# Altium footprint library IntegratedCircuit.PcbLib: 41 footprints (part 1 of 3)
Each footprint in its own frame and in the unit in brackets; x right, y up, seen from the top. Pads: shape width x height; smd on the part's side, far side on the other; paste and mask are expansions set on the pad; w line width, h text height; cw(c..) or ccw(c..) is an arc to the next point about the centre after c.
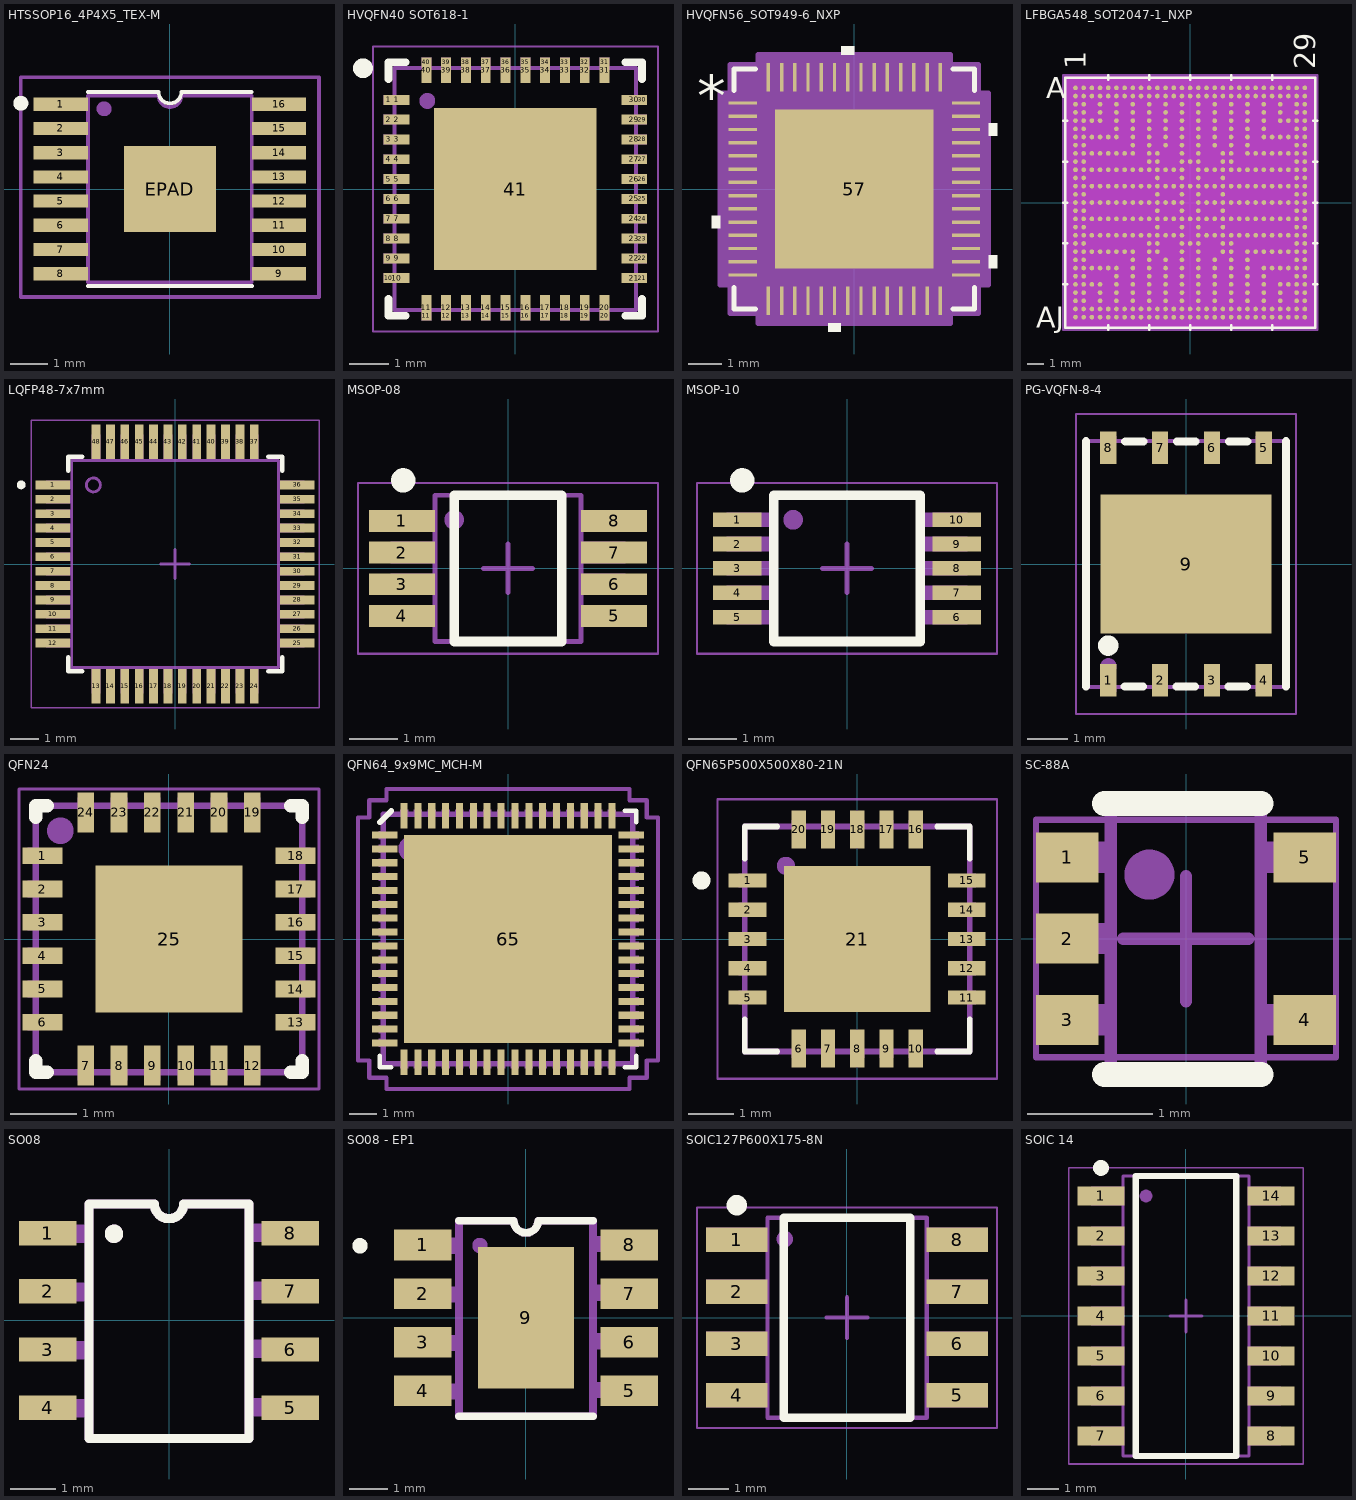
[diagram p0: the footprints below, top view; thin cyan lines are the x and y axes]

## HTSSOP16_4P4X5_TEX-M [mil]
pads (17):
  rect 57.5x14 smd paste+0 mask+0: 1(-115.25,89.57) 2(-115.25,63.98) 3(-115.25,38.39) 4(-115.25,12.8) 5(-115.25,-12.8) 6(-115.25,-38.39) 7(-115.25,-63.98) 8(-115.25,-89.57) 9(115.25,-89.57) 10(115.25,-63.98) 11(115.25,-38.39) 12(115.25,-12.8) 13(115.25,12.8) 14(115.25,38.39) 15(115.25,63.98) 16(115.25,89.57)
  rect 96.85x90.94 smd paste+0 mask+0: EPAD(0,0)
Top Overlay:
  circle w11.81: c-157.48,90.55 r1.97
  lines w3.94: -86.61,-102.36 86.61,-102.36 ; -86.5,102.44 -12,102.44 ccw(c0,102.44) 12,102.44 86.5,102.44
Top Assembly:
  circle w11.81: c-69.55,84.76 r1.97
  region: 122,95.57 86.5,95.57 86.5,83.57 122,83.57
  region: 122,69.98 86.5,69.98 86.5,57.98 122,57.98
  region: 122,44.39 86.5,44.39 86.5,32.39 122,32.39
  region: 122,18.8 86.5,18.8 86.5,6.8 122,6.8
  region: 122,-6.8 86.5,-6.8 86.5,-18.8 122,-18.8
  region: 122,-32.39 86.5,-32.39 86.5,-44.39 122,-44.39
  region: 122,-57.98 86.5,-57.98 86.5,-69.98 122,-69.98
  region: 122,-83.57 86.5,-83.57 86.5,-95.57 122,-95.57
  rectangle: -122,-95.57 -86.5,-83.57
  rectangle: -122,-69.98 -86.5,-57.98
  rectangle: -122,-44.39 -86.5,-32.39
  rectangle: -122,-18.8 -86.5,-6.8
  rectangle: -122,6.8 -86.5,18.8
  rectangle: -122,32.39 -86.5,44.39
  rectangle: -122,57.98 -86.5,69.98
  rectangle: -122,83.57 -86.5,95.57
  lines w3.94: -86.5,-95.57 -86.5,-83.57 ; -86.5,-69.98 -86.5,-57.98 ; -86.5,-44.39 -86.5,-32.39 ; -86.5,-18.8 -86.5,-6.8 ; -86.5,6.8 -86.5,18.8 ; -86.5,32.39 -86.5,44.39 ; -86.5,57.98 -86.5,69.98 ; -86.5,83.57 -86.5,95.57 ; 86.5,-95.57 86.5,-83.57 ; 86.5,-69.98 86.5,-57.98 ; 86.5,-44.39 86.5,-32.39 ; 86.5,-18.8 86.5,-6.8 ; 86.5,6.8 86.5,18.8 ; 86.5,32.39 86.5,44.39 ; 86.5,57.98 86.5,69.98 ; 86.5,83.57 86.5,95.57 ; -86.5,-98.5 -86.5,98.5 -12,98.5 ccw(c0,98.5) 12,98.5 86.5,98.5 86.5,-98.5 -86.5,-98.5
  text ".Designator" at -147.59,-9.84 h29.53
Mechanical 15:
  lines w3.94: -39.37,0 39.37,0 ; 0,-39.37 0,39.37 ; -157.48,-114.17 157.48,-114.17 157.48,118.11 -157.48,118.11 -157.48,-114.17
3D body "HTSSOP16_4P4X5_TEX.step": height 47.09, standoff 0, extent -122.01,-98.5 122.01,98.5

## HVQFN40 SOT618-1 [mm] "QFN, 40-Leads, Body 6.00x6.00mm, Pitch 0.50mm, Thermal Pad 4.10x4.10mm, IPC Medium Density"
height 1
pads (81):
  rect 0.25x0.25 on Mech13: 1(-3.2,2.25) 2(-3.2,1.75) 3(-3.2,1.25) 4(-3.2,0.75) 5(-3.2,0.25) 6(-3.2,-0.25) 7(-3.2,-0.75) 8(-3.2,-1.25) 9(-3.2,-1.75) 10(-3.2,-2.25) 11(-2.25,-3.2) 12(-1.75,-3.2) 13(-1.25,-3.2) 14(-0.75,-3.2) 15(-0.25,-3.2) 16(0.25,-3.2) 17(0.75,-3.2) 18(1.25,-3.2) 19(1.75,-3.2) 20(2.25,-3.2) 21(3.2,-2.25) 22(3.2,-1.75) 23(3.2,-1.25) 24(3.2,-0.75) 25(3.2,-0.25) 26(3.2,0.25) 27(3.2,0.75) 28(3.2,1.25) 29(3.2,1.75) 30(3.2,2.25) 31(2.25,3.2) 32(1.75,3.2) 33(1.25,3.2) 34(0.75,3.2) 35(0.25,3.2) 36(-0.25,3.2) 37(-0.75,3.2) 38(-1.25,3.2) 39(-1.75,3.2) 40(-2.25,3.2)
  rect 0.65x0.25 smd: 1(-3,2.25) 2(-3,1.75) 3(-3,1.25) 4(-3,0.75) 5(-3,0.25) 6(-3,-0.25) 7(-3,-0.75) 8(-3,-1.25) 9(-3,-1.75) 10(-3,-2.25) 21(3,-2.25) 22(3,-1.75) 23(3,-1.25) 24(3,-0.75) 25(3,-0.25) 26(3,0.25) 27(3,0.75) 28(3,1.25) 29(3,1.75) 30(3,2.25)
  rect 0.25x0.65 smd: 11(-2.25,-3) 12(-1.75,-3) 13(-1.25,-3) 14(-0.75,-3) 15(-0.25,-3) 16(0.25,-3) 17(0.75,-3) 18(1.25,-3) 19(1.75,-3) 20(2.25,-3) 31(2.25,3) 32(1.75,3) 33(1.25,3) 34(0.75,3) 35(0.25,3) 36(-0.25,3) 37(-0.75,3) 38(-1.25,3) 39(-1.75,3) 40(-2.25,3)
  rect 4.1x4.1 smd: 41(0,0)
Top Overlay:
  circle w0.25: c-3.85,3.05 r0.125
  lines w0.2: -3.2,-2.775 -3.2,-3.2 -2.775,-3.2 ; -3.2,2.775 -3.2,3.2 -2.775,3.2 ; 2.775,-3.2 3.2,-3.2 3.2,-2.775 ; 2.775,3.2 3.2,3.2 3.2,2.775
Top Assembly:
  circle w0.3: c-2.225,2.225 r0.05
  lines w0.1: -3.05,-3.05 -3.05,3.05 3.05,3.05 3.05,-3.05 -3.05,-3.05
  text ".Designator" at -3.749,-0.25 h0.75
Mechanical 15:
  lines w0.05: -3.6,-3.6 -3.6,3.6 3.6,3.6 3.6,-3.6 -3.6,-3.6
  lines w0.1: -0.5,0 0.5,0 ; 0,-0.5 0,0.5
3D body "QFN-40.STEP": height 1.06, standoff 0.01, extent -3.075,-3.075 3.075,3.075

## HVQFN56_SOT949-6_NXP [mm]
pads (57):
  rect 0.859x0.102 smd paste+0 mask+0: 1(-3.376,2.6) 2(-3.376,2.2) 3(-3.376,1.8) 4(-3.376,1.4) 5(-3.376,1) 6(-3.376,0.6) 7(-3.376,0.2) 8(-3.376,-0.2) 9(-3.376,-0.6) 10(-3.376,-1) 11(-3.376,-1.4) 12(-3.376,-1.8) 13(-3.376,-2.2) 14(-3.376,-2.6) 29(3.376,-2.6) 30(3.376,-2.2) 31(3.376,-1.8) 32(3.376,-1.4) 33(3.376,-1) 34(3.376,-0.6) 35(3.376,-0.2) 36(3.376,0.2) 37(3.376,0.6) 38(3.376,1) 39(3.376,1.4) 40(3.376,1.8) 41(3.376,2.2) 42(3.376,2.6)
  rect 0.102x0.859 smd paste+0 mask+0: 15(-2.6,-3.376) 16(-2.2,-3.376) 17(-1.8,-3.376) 18(-1.4,-3.376) 19(-1,-3.376) 20(-0.6,-3.376) 21(-0.2,-3.376) 22(0.2,-3.376) 23(0.6,-3.376) 24(1,-3.376) 25(1.4,-3.376) 26(1.8,-3.376) 27(2.2,-3.376) 28(2.6,-3.376) 43(2.6,3.376) 44(2.2,3.376) 45(1.8,3.376) 46(1.4,3.376) 47(1,3.376) 48(0.6,3.376) 49(0.2,3.376) 50(-0.2,3.376) 51(-0.6,3.376) 52(-1,3.376) 53(-1.4,3.376) 54(-1.8,3.376) 55(-2.2,3.376) 56(-2.6,3.376)
  rect 4.801x4.801 smd paste-2.4 mask+0: 57(0,0)
Top Overlay:
  region: -0.009,4.059 -0.39,4.059 -0.39,4.313 -0.009,4.313
  region: 4.059,1.99 4.313,1.99 4.313,1.609 4.059,1.609
  region: 4.059,-2.01 4.313,-2.01 4.313,-2.391 4.059,-2.391
  region: -0.409,-4.059 -0.79,-4.059 -0.79,-4.313 -0.409,-4.313
  region: -4.059,-0.81 -4.313,-0.81 -4.313,-1.191 -4.059,-1.191
  lines w0.152: -3.632,-2.984 -3.632,-3.632 -2.984,-3.632 ; -3.632,2.984 -3.632,3.632 -2.984,3.632 ; 2.984,-3.632 3.632,-3.632 3.632,-2.984 ; 2.984,3.632 3.632,3.632 3.632,2.984
  text "*" at -4.758,2.165 h1.27
Top Paste:
  region: 2.3,-0.9 0.9,-0.9 0.9,-2.3 2.3,-2.3
  region: 2.3,0.7 0.9,0.7 0.9,-0.7 2.3,-0.7
  region: 2.3,2.3 0.9,2.3 0.9,0.9 2.3,0.9
  region: 0.7,-0.9 -0.7,-0.9 -0.7,-2.3 0.7,-2.3
  region: 0.7,0.7 -0.7,0.7 -0.7,-0.7 0.7,-0.7
  region: 0.7,2.3 -0.7,2.3 -0.7,0.9 0.7,0.9
  region: -0.9,-0.9 -2.3,-0.9 -2.3,-2.3 -0.9,-2.3
  region: -0.9,0.7 -2.3,0.7 -2.3,-0.7 -0.9,-0.7
  region: -0.9,2.3 -2.3,2.3 -2.3,0.9 -0.9,0.9
Top Assembly:
  lines w0.025: -3.505,2.235 -2.235,3.505 ; -3.505,-3.505 -3.505,3.505 3.505,3.505 3.505,-3.505 -3.505,-3.505 ; -3.505,-2.676 -3.505,-2.524 -3.505,-2.676 ; -3.505,-2.276 -3.505,-2.124 -3.505,-2.276 ; -3.505,-1.876 -3.505,-1.724 -3.505,-1.876 ; -3.505,-1.476 -3.505,-1.324 -3.505,-1.476 ; -3.505,-1.076 -3.505,-0.924 -3.505,-1.076 ; -3.505,-0.676 -3.505,-0.524 -3.505,-0.676 ; -3.505,-0.276 -3.505,-0.124 -3.505,-0.276 ; -3.505,0.124 -3.505,0.276 -3.505,0.124 ; -3.505,0.524 -3.505,0.676 -3.505,0.524 ; -3.505,0.924 -3.505,1.076 -3.505,0.924 ; -3.505,1.324 -3.505,1.476 -3.505,1.324 ; -3.505,1.724 -3.505,1.876 -3.505,1.724 ; -3.505,2.124 -3.505,2.276 -3.505,2.124 ; -3.505,2.524 -3.505,2.676 -3.505,2.524 ; -2.676,-3.505 -2.524,-3.505 -2.676,-3.505 ; -2.676,3.505 -2.524,3.505 -2.676,3.505 ; -2.276,-3.505 -2.124,-3.505 -2.276,-3.505 ; -2.276,3.505 -2.124,3.505 -2.276,3.505 ; -1.876,-3.505 -1.724,-3.505 -1.876,-3.505 ; -1.876,3.505 -1.724,3.505 -1.876,3.505 ; -1.476,-3.505 -1.324,-3.505 -1.476,-3.505 ; -1.476,3.505 -1.324,3.505 -1.476,3.505 ; -1.076,-3.505 -0.924,-3.505 -1.076,-3.505 ; -1.076,3.505 -0.924,3.505 -1.076,3.505 ; -0.676,-3.505 -0.524,-3.505 -0.676,-3.505 ; -0.676,3.505 -0.524,3.505 -0.676,3.505 ; -0.276,-3.505 -0.124,-3.505 -0.276,-3.505 ; -0.276,3.505 -0.124,3.505 -0.276,3.505 ; 0.124,-3.505 0.276,-3.505 0.124,-3.505 ; 0.124,3.505 0.276,3.505 0.124,3.505 ; 0.524,-3.505 0.676,-3.505 0.524,-3.505 ; 0.524,3.505 0.676,3.505 0.524,3.505 ; 0.924,-3.505 1.076,-3.505 0.924,-3.505 ; 0.924,3.505 1.076,3.505 0.924,3.505 ; 1.324,-3.505 1.476,-3.505 1.324,-3.505 ; 1.324,3.505 1.476,3.505 1.324,3.505 ; 1.724,-3.505 1.876,-3.505 1.724,-3.505 ; 1.724,3.505 1.876,3.505 1.724,3.505 ; 2.124,-3.505 2.276,-3.505 2.124,-3.505 ; 2.124,3.505 2.276,3.505 2.124,3.505 ; 2.524,-3.505 2.676,-3.505 2.524,-3.505 ; 2.524,3.505 2.676,3.505 2.524,3.505 ; 3.505,-2.676 3.505,-2.524 3.505,-2.676 ; 3.505,-2.276 3.505,-2.124 3.505,-2.276 ; 3.505,-1.876 3.505,-1.724 3.505,-1.876 ; 3.505,-1.476 3.505,-1.324 3.505,-1.476 ; 3.505,-1.076 3.505,-0.924 3.505,-1.076 ; 3.505,-0.676 3.505,-0.524 3.505,-0.676 ; 3.505,-0.276 3.505,-0.124 3.505,-0.276 ; 3.505,0.124 3.505,0.276 3.505,0.124 ; 3.505,0.524 3.505,0.676 3.505,0.524 ; 3.505,0.924 3.505,1.076 3.505,0.924 ; 3.505,1.324 3.505,1.476 3.505,1.324 ; 3.505,1.724 3.505,1.876 3.505,1.724 ; 3.505,2.124 3.505,2.276 3.505,2.124 ; 3.505,2.524 3.505,2.676 3.505,2.524
  text "*" at -3.264,2.165 h1.27
Mechanical 15:
  region: -2.905,-3.759 -3.759,-3.759 -3.759,-2.905 -4.059,-2.905 -4.059,2.905 -3.759,2.905 -3.759,3.759 -2.905,3.759 -2.905,4.059 2.905,4.059 2.905,3.759 3.759,3.759 3.759,2.905 4.059,2.905 4.059,-2.905 3.759,-2.905 3.759,-3.759 2.905,-3.759 2.905,-4.059 -2.905,-4.059
  lines w0.152: -4.059,-2.905 -4.059,2.905 -3.759,2.905 -3.759,3.759 -2.905,3.759 -2.905,4.059 2.905,4.059 2.905,3.759 3.759,3.759 3.759,2.905 4.059,2.905 4.059,-2.905 3.759,-2.905 3.759,-3.759 2.905,-3.759 2.905,-4.059 -2.905,-4.059 -2.905,-3.759 -3.759,-3.759 -3.759,-2.905 -4.059,-2.905
3D body "HVQFN56_SOT949-6_NXP.step": height 0.99, standoff 0, extent -3.505,-3.505 3.505,3.505

## LFBGA548_SOT2047-1_NXP [mm]
pads (548):
  round 0.284 smd paste+0 mask+0: A1(-7,7) A2(-6.5,7) A3(-6,7) A4(-5.5,7) A5(-5,7) A6(-4.5,7) A7(-4,7) A8(-3.5,7) A9(-3,7) A10(-2.5,7) A11(-2,7) A12(-1.5,7) A13(-1,7) A14(-0.5,7) A15(0,7) A16(0.5,7) A17(1,7) A18(1.5,7) A19(2,7) A20(2.5,7) A21(3,7) A22(3.5,7) A23(4,7) A24(4.5,7) A25(5,7) A26(5.5,7) A27(6,7) A28(6.5,7) A29(7,7) AA1(-7,-3) AA2(-6.5,-3) AA3(-6,-3) AA4(-5.5,-3) AA5(-5,-3) AA6(-4.5,-3) AA7(-4,-3) AA8(-3.5,-3) AA10(-2.5,-3) AA11(-2,-3) AA14(-0.5,-3) AA16(0.5,-3) AA19(2,-3) AA20(2.5,-3) AA22(3.5,-3) AA23(4,-3) AA24(4.5,-3) AA25(5,-3) AA26(5.5,-3) AA27(6,-3) AA28(6.5,-3) AA29(7,-3) AB1(-7,-3.5) AB2(-6.5,-3.5) AB8(-3.5,-3.5) AB10(-2.5,-3.5) AB12(-1.5,-3.5) AB14(-0.5,-3.5) AB16(0.5,-3.5) AB18(1.5,-3.5) AB20(2.5,-3.5) AB22(3.5,-3.5) AB28(6.5,-3.5) AB29(7,-3.5) AC1(-7,-4) AC2(-6.5,-4) AC3(-6,-4) AC4(-5.5,-4) AC5(-5,-4) AC6(-4.5,-4) AC8(-3.5,-4) AC10(-2.5,-4) AC12(-1.5,-4) AC14(-0.5,-4) AC16(0.5,-4) AC18(1.5,-4) AC20(2.5,-4) AC22(3.5,-4) AC24(4.5,-4) AC25(5,-4) AC26(5.5,-4) AC27(6,-4) AC28(6.5,-4) AC29(7,-4) AD1(-7,-4.5) AD2(-6.5,-4.5) AD6(-4.5,-4.5) AD8(-3.5,-4.5) AD10(-2.5,-4.5) AD12(-1.5,-4.5) AD14(-0.5,-4.5) AD16(0.5,-4.5) AD18(1.5,-4.5) AD20(2.5,-4.5) AD22(3.5,-4.5) AD24(4.5,-4.5) AD28(6.5,-4.5) AD29(7,-4.5) AE1(-7,-5) AE2(-6.5,-5) AE3(-6,-5) AE4(-5.5,-5) AE6(-4.5,-5) AE8(-3.5,-5) AE10(-2.5,-5) AE12(-1.5,-5) AE14(-0.5,-5) AE16(0.5,-5) AE18(1.5,-5) AE20(2.5,-5) AE22(3.5,-5) AE24(4.5,-5) AE26(5.5,-5) AE27(6,-5) AE28(6.5,-5) AE29(7,-5) AF1(-7,-5.5) AF2(-6.5,-5.5) AF4(-5.5,-5.5) AF6(-4.5,-5.5) AF8(-3.5,-5.5) AF10(-2.5,-5.5) AF12(-1.5,-5.5) AF14(-0.5,-5.5) AF16(0.5,-5.5) AF18(1.5,-5.5) AF20(2.5,-5.5) AF22(3.5,-5.5) AF24(4.5,-5.5) AF26(5.5,-5.5) AF28(6.5,-5.5) AF29(7,-5.5) AG1(-7,-6) AG2(-6.5,-6) AG4(-5.5,-6) AG6(-4.5,-6) AG8(-3.5,-6) AG10(-2.5,-6) AG12(-1.5,-6) AG14(-0.5,-6) AG16(0.5,-6) AG18(1.5,-6) AG20(2.5,-6) AG22(3.5,-6) AG24(4.5,-6) AG26(5.5,-6) AG28(6.5,-6) AG29(7,-6) AH1(-7,-6.5) AH2(-6.5,-6.5) AH3(-6,-6.5) AH4(-5.5,-6.5) AH5(-5,-6.5) AH6(-4.5,-6.5) AH7(-4,-6.5) AH8(-3.5,-6.5) AH9(-3,-6.5) AH10(-2.5,-6.5) AH11(-2,-6.5) AH12(-1.5,-6.5) AH13(-1,-6.5) AH14(-0.5,-6.5) AH15(0,-6.5) AH16(0.5,-6.5) AH17(1,-6.5) AH18(1.5,-6.5) AH19(2,-6.5) AH20(2.5,-6.5) AH21(3,-6.5) AH22(3.5,-6.5) AH23(4,-6.5) AH24(4.5,-6.5) AH25(5,-6.5) AH26(5.5,-6.5) AH27(6,-6.5) AH28(6.5,-6.5) AH29(7,-6.5) AJ1(-7,-7) AJ2(-6.5,-7) AJ3(-6,-7) AJ4(-5.5,-7) AJ5(-5,-7) AJ6(-4.5,-7) AJ7(-4,-7) AJ8(-3.5,-7) AJ9(-3,-7) AJ10(-2.5,-7) AJ11(-2,-7) AJ12(-1.5,-7) AJ13(-1,-7) AJ14(-0.5,-7) AJ15(0,-7) AJ16(0.5,-7) AJ17(1,-7) AJ18(1.5,-7) AJ19(2,-7) AJ20(2.5,-7) AJ21(3,-7) AJ22(3.5,-7) AJ23(4,-7) AJ24(4.5,-7) AJ25(5,-7) AJ26(5.5,-7) AJ27(6,-7) AJ28(6.5,-7) AJ29(7,-7) B1(-7,6.5) B2(-6.5,6.5) B3(-6,6.5) B4(-5.5,6.5) B5(-5,6.5) B6(-4.5,6.5) B7(-4,6.5) B8(-3.5,6.5) B9(-3,6.5) B10(-2.5,6.5) B11(-2,6.5) B12(-1.5,6.5) B13(-1,6.5) B14(-0.5,6.5) B15(0,6.5) B16(0.5,6.5) B17(1,6.5) B18(1.5,6.5) B19(2,6.5) B20(2.5,6.5) B21(3,6.5) B22(3.5,6.5) B23(4,6.5) B24(4.5,6.5) B25(5,6.5) B26(5.5,6.5) B27(6,6.5) B28(6.5,6.5) B29(7,6.5) C1(-7,6) C2(-6.5,6) C4(-5.5,6) C6(-4.5,6) C8(-3.5,6) C10(-2.5,6) C12(-1.5,6) C14(-0.5,6) C16(0.5,6) C18(1.5,6) C20(2.5,6) C22(3.5,6) C24(4.5,6) C26(5.5,6) C28(6.5,6) C29(7,6) D1(-7,5.5) D2(-6.5,5.5) D4(-5.5,5.5) D6(-4.5,5.5) D8(-3.5,5.5) D10(-2.5,5.5) D12(-1.5,5.5) D14(-0.5,5.5) D16(0.5,5.5) D18(1.5,5.5) D20(2.5,5.5) D22(3.5,5.5) D24(4.5,5.5) D26(5.5,5.5) D28(6.5,5.5) D29(7,5.5) E1(-7,5) E2(-6.5,5) E3(-6,5) E4(-5.5,5) E6(-4.5,5) E8(-3.5,5) E10(-2.5,5) E12(-1.5,5) E14(-0.5,5) E16(0.5,5) E18(1.5,5) E20(2.5,5) E22(3.5,5) E24(4.5,5) E26(5.5,5) E27(6,5) E28(6.5,5) E29(7,5) F1(-7,4.5) F2(-6.5,4.5) F6(-4.5,4.5) F8(-3.5,4.5) F10(-2.5,4.5) F12(-1.5,4.5) F14(-0.5,4.5) F16(0.5,4.5) F18(1.5,4.5) F20(2.5,4.5) F22(3.5,4.5) F24(4.5,4.5) F28(6.5,4.5) F29(7,4.5) G1(-7,4) G2(-6.5,4) G3(-6,4) G4(-5.5,4) G5(-5,4) G6(-4.5,4) G8(-3.5,4) G10(-2.5,4) G12(-1.5,4) G14(-0.5,4) G16(0.5,4) G18(1.5,4) G20(2.5,4) G22(3.5,4) G24(4.5,4) G25(5,4) G26(5.5,4) G27(6,4) G28(6.5,4) G29(7,4) H1(-7,3.5) H2(-6.5,3.5) H8(-3.5,3.5) H10(-2.5,3.5) H12(-1.5,3.5) H14(-0.5,3.5) H16(0.5,3.5) H18(1.5,3.5) H20(2.5,3.5) H22(3.5,3.5) H28(6.5,3.5) H29(7,3.5) J1(-7,3) J2(-6.5,3) J3(-6,3) J4(-5.5,3) J5(-5,3) J6(-4.5,3) J7(-4,3) J8(-3.5,3) J10(-2.5,3) J11(-2,3) J14(-0.5,3) J16(0.5,3) J19(2,3) J20(2.5,3) J22(3.5,3) J23(4,3) J24(4.5,3) J25(5,3) J26(5.5,3) J27(6,3) J28(6.5,3) J29(7,3) K1(-7,2.5) K2(-6.5,2.5) K10(-2.5,2.5) K11(-2,2.5) K14(-0.5,2.5) K15(0,2.5) K16(0.5,2.5) K19(2,2.5) K20(2.5,2.5) K28(6.5,2.5) K29(7,2.5) L1(-7,2) L2(-6.5,2) L3(-6,2) L4(-5.5,2) L5(-5,2) L6(-4.5,2) L7(-4,2) L8(-3.5,2) L9(-3,2) L10(-2.5,2) L11(-2,2) L12(-1.5,2) L13(-1,2) L14(-0.5,2) L16(0.5,2) L17(1,2) L18(1.5,2) L19(2,2) L20(2.5,2) L21(3,2) L22(3.5,2) L23(4,2) L24(4.5,2) L25(5,2) L26(5.5,2) L27(6,2) L28(6.5,2) L29(7,2) M1(-7,1.5) M2(-6.5,1.5) M11(-2,1.5) M14(-0.5,1.5) M16(0.5,1.5) M19(2,1.5) M28(6.5,1.5) M29(7,1.5) N1(-7,1) N2(-6.5,1) N3(-6,1) N4(-5.5,1) N5(-5,1) N6(-4.5,1) N7(-4,1) N8(-3.5,1) N9(-3,1) N10(-2.5,1) N11(-2,1) N12(-1.5,1) N13(-1,1) N14(-0.5,1) N15(0,1) N16(0.5,1) N17(1,1) N18(1.5,1) N19(2,1) N20(2.5,1) N21(3,1) N22(3.5,1) N23(4,1) N24(4.5,1) N25(5,1) N26(5.5,1) N27(6,1) N28(6.5,1) N29(7,1) P1(-7,0.5) P2(-6.5,0.5) P11(-2,0.5) P14(-0.5,0.5) P16(0.5,0.5) P19(2,0.5) P28(6.5,0.5) P29(7,0.5) R1(-7,0) R2(-6.5,0) R3(-6,0) R4(-5.5,0) R5(-5,0) R6(-4.5,0) R7(-4,0) R8(-3.5,0) R9(-3,0) R10(-2.5,0) R11(-2,0) R12(-1.5,0) R13(-1,0) R14(-0.5,0) R16(0.5,0) R17(1,0) R18(1.5,0) R19(2,0) R20(2.5,0) R21(3,0) R22(3.5,0) R23(4,0) R24(4.5,0) R25(5,0) R26(5.5,0) R27(6,0) R28(6.5,0) R29(7,0) T1(-7,-0.5) T2(-6.5,-0.5) T11(-2,-0.5) T14(-0.5,-0.5) T16(0.5,-0.5) T19(2,-0.5) T28(6.5,-0.5) T29(7,-0.5) U1(-7,-1) U2(-6.5,-1) U3(-6,-1) U4(-5.5,-1) U5(-5,-1) U6(-4.5,-1) U7(-4,-1) U8(-3.5,-1) U9(-3,-1) U10(-2.5,-1) U11(-2,-1) U12(-1.5,-1) U13(-1,-1) U14(-0.5,-1) U15(0,-1) U16(0.5,-1) U17(1,-1) U18(1.5,-1) U19(2,-1) U20(2.5,-1) U21(3,-1) U22(3.5,-1) U23(4,-1) U24(4.5,-1) U25(5,-1) U26(5.5,-1) U27(6,-1) U28(6.5,-1) U29(7,-1) V1(-7,-1.5) V2(-6.5,-1.5) V11(-2,-1.5) V14(-0.5,-1.5) V16(0.5,-1.5) V19(2,-1.5) V28(6.5,-1.5) V29(7,-1.5) W1(-7,-2) W2(-6.5,-2) W3(-6,-2) W4(-5.5,-2) W5(-5,-2) W6(-4.5,-2) W7(-4,-2) W8(-3.5,-2) W9(-3,-2) W10(-2.5,-2) W11(-2,-2) W12(-1.5,-2) W13(-1,-2) W14(-0.5,-2) W16(0.5,-2) W17(1,-2) W18(1.5,-2) W19(2,-2) W20(2.5,-2) W21(3,-2) W22(3.5,-2) W23(4,-2) W24(4.5,-2) W25(5,-2) W26(5.5,-2) W27(6,-2) W28(6.5,-2) W29(7,-2) Y1(-7,-2.5) Y2(-6.5,-2.5) Y10(-2.5,-2.5) Y11(-2,-2.5) Y14(-0.5,-2.5) Y15(0,-2.5) Y16(0.5,-2.5) Y19(2,-2.5) Y20(2.5,-2.5) Y28(6.5,-2.5) Y29(7,-2.5)
Top Overlay:
  lines w0.152: -7.76,-5 -7.506,-5 ; -7.76,-2.5 -7.506,-2.5 ; -7.76,0 -7.506,0 ; -7.76,2.5 -7.506,2.5 ; -7.76,5 -7.506,5 ; -5,-7.76 -5,-7.506 ; -5,7.506 -5,7.76 ; -2.5,-7.76 -2.5,-7.506 ; -2.5,7.506 -2.5,7.76 ; 0,-7.76 0,-7.506 ; 0,7.506 0,7.76 ; 2.5,-7.76 2.5,-7.506 ; 2.5,7.506 2.5,7.76 ; 5,-7.76 5,-7.506 ; 5,7.506 5,7.76 ; 7.506,-5 7.76,-5 ; 7.506,-2.5 7.76,-2.5 ; 7.506,0 7.76,0 ; 7.506,2.5 7.76,2.5 ; 7.506,5 7.76,5 ; -7.633,-7.633 7.633,-7.633 7.633,7.633 -7.633,7.633 -7.633,-7.633
  text "A" at -8.776,6.365 h1.27
  text "AJ" at -9.411,-7.635 h1.27
  text "1" at -6.365,8.141 h1.27
  text "29" at 7.635,8.141 h1.27
Bottom Overlay:
  text "A" at -8.141,6.365 h1.27
  text "AJ" at -7.76,-7.76 h1.27
  text "1" at -7.635,8.141 h1.27
  text "29" at 6.365,8.141 h1.27
Keep-Out Layer:
  region: -7.695,-7.695 -7.695,7.695 7.695,7.695 7.695,-7.695
Top Assembly:
  lines w0.025: -7.506,7.256 -7.256,7.506 ; -7.506,-7.506 7.506,-7.506 7.506,7.506 -7.506,7.506 -7.506,-7.506
  text "A" at -8.776,6.365 h1.27
  text "AJ" at -9.411,-7.635 h1.27
  text "1" at -6.365,8.141 h1.27
  text "29" at 7.635,8.141 h1.27
Mechanical 15:
  region: 7.76,-7.76 -7.76,-7.76 -7.76,7.76 7.76,7.76
  lines w0.152: -7.76,-7.76 -7.76,7.76 7.76,7.76 7.76,-7.76 -7.76,-7.76
3D body "MIMX8ML8CVNKZAB.STEP": height 1.26, standoff -0.22, extent -7.5,-7.5 7.5,7.5

## LQFP48-7x7mm [mm]
pads (48):
  rect 1.194x0.305 smd paste+0 mask+0: 1(-4.25,2.75) 2(-4.25,2.25) 3(-4.25,1.75) 4(-4.25,1.25) 5(-4.25,0.75) 6(-4.25,0.25) 7(-4.25,-0.25) 8(-4.25,-0.75) 9(-4.25,-1.25) 10(-4.25,-1.75) 11(-4.25,-2.25) 12(-4.25,-2.75) 25(4.25,-2.75) 26(4.25,-2.25) 27(4.25,-1.75) 28(4.25,-1.25) 29(4.25,-0.75) 30(4.25,-0.25) 31(4.25,0.25) 32(4.25,0.75) 33(4.25,1.25) 34(4.25,1.75) 35(4.25,2.25) 36(4.25,2.75)
  rect 0.305x1.194 smd paste+0 mask+0: 13(-2.75,-4.25) 14(-2.25,-4.25) 15(-1.75,-4.25) 16(-1.25,-4.25) 17(-0.75,-4.25) 18(-0.25,-4.25) 19(0.25,-4.25) 20(0.75,-4.25) 21(1.25,-4.25) 22(1.75,-4.25) 23(2.25,-4.25) 24(2.75,-4.25) 37(2.75,4.25) 38(2.25,4.25) 39(1.75,4.25) 40(1.25,4.25) 41(0.75,4.25) 42(0.25,4.25) 43(-0.25,4.25) 44(-0.75,4.25) 45(-1.25,4.25) 46(-1.75,4.25) 47(-2.25,4.25) 48(-2.75,4.25)
Top Overlay:
  circle w0.152: c-5.351,2.75 r0.076
  lines w0.152: -3.721,-3.235 -3.721,-3.721 -3.235,-3.721 ; -3.721,3.235 -3.721,3.721 -3.235,3.721 ; 3.235,-3.721 3.721,-3.721 3.721,-3.235 ; 3.235,3.721 3.721,3.721 3.721,3.235
Top Assembly:
  circle w0.1: c-2.842,2.747 r0.242
  region: -3.593,2.599 -3.593,2.901 -4.494,2.901 -4.494,2.599
  region: -3.593,2.099 -3.593,2.401 -4.494,2.401 -4.494,2.099
  region: -3.593,1.599 -3.593,1.901 -4.494,1.901 -4.494,1.599
  region: -3.593,1.099 -3.593,1.401 -4.494,1.401 -4.494,1.099
  region: -3.593,0.599 -3.593,0.901 -4.494,0.901 -4.494,0.599
  region: -3.593,0.099 -3.593,0.401 -4.494,0.401 -4.494,0.099
  region: -2.599,-3.593 -2.901,-3.593 -2.901,-4.494 -2.599,-4.494
  region: -2.099,-3.593 -2.401,-3.593 -2.401,-4.494 -2.099,-4.494
  region: -1.599,-3.593 -1.901,-3.593 -1.901,-4.494 -1.599,-4.494
  region: -1.099,-3.593 -1.401,-3.593 -1.401,-4.494 -1.099,-4.494
  region: -0.599,-3.593 -0.901,-3.593 -0.901,-4.494 -0.599,-4.494
  region: -0.099,-3.593 -0.401,-3.593 -0.401,-4.494 -0.099,-4.494
  region: 3.593,-2.599 3.593,-2.901 4.494,-2.901 4.494,-2.599
  region: 3.593,-2.099 3.593,-2.401 4.494,-2.401 4.494,-2.099
  region: 3.593,-1.599 3.593,-1.901 4.494,-1.901 4.494,-1.599
  region: 3.593,-1.099 3.593,-1.401 4.494,-1.401 4.494,-1.099
  region: 3.593,-0.599 3.593,-0.901 4.494,-0.901 4.494,-0.599
  region: 3.593,-0.099 3.593,-0.401 4.494,-0.401 4.494,-0.099
  rectangle: 2.599,3.593 2.901,4.494
  rectangle: 2.099,3.593 2.401,4.494
  rectangle: 1.599,3.593 1.901,4.494
  rectangle: 1.099,3.593 1.401,4.494
  rectangle: 0.599,3.593 0.901,4.494
  rectangle: 0.099,3.593 0.401,4.494
  region: -3.593,-0.401 -3.593,-0.099 -4.494,-0.099 -4.494,-0.401
  region: -3.593,-0.901 -3.593,-0.599 -4.494,-0.599 -4.494,-0.901
  region: -3.593,-1.401 -3.593,-1.099 -4.494,-1.099 -4.494,-1.401
  region: -3.593,-1.901 -3.593,-1.599 -4.494,-1.599 -4.494,-1.901
  region: -3.593,-2.401 -3.593,-2.099 -4.494,-2.099 -4.494,-2.401
  region: -3.593,-2.901 -3.593,-2.599 -4.494,-2.599 -4.494,-2.901
  region: 0.401,-3.593 0.099,-3.593 0.099,-4.494 0.401,-4.494
  region: 0.901,-3.593 0.599,-3.593 0.599,-4.494 0.901,-4.494
  region: 1.401,-3.593 1.099,-3.593 1.099,-4.494 1.401,-4.494
  region: 1.901,-3.593 1.599,-3.593 1.599,-4.494 1.901,-4.494
  region: 2.401,-3.593 2.099,-3.593 2.099,-4.494 2.401,-4.494
  region: 2.901,-3.593 2.599,-3.593 2.599,-4.494 2.901,-4.494
  region: 3.593,0.401 3.593,0.099 4.494,0.099 4.494,0.401
  region: 3.593,0.901 3.593,0.599 4.494,0.599 4.494,0.901
  region: 3.593,1.401 3.593,1.099 4.494,1.099 4.494,1.401
  region: 3.593,1.901 3.593,1.599 4.494,1.599 4.494,1.901
  region: 3.593,2.401 3.593,2.099 4.494,2.099 4.494,2.401
  region: 3.593,2.901 3.593,2.599 4.494,2.599 4.494,2.901
  rectangle: -0.401,3.593 -0.099,4.494
  rectangle: -0.901,3.593 -0.599,4.494
  rectangle: -1.401,3.593 -1.099,4.494
  rectangle: -1.901,3.593 -1.599,4.494
  rectangle: -2.401,3.593 -2.099,4.494
  rectangle: -2.901,3.593 -2.599,4.494
  lines w0.1: -3.595,-3.593 3.596,-3.593 3.596,3.593 -3.595,3.593 -3.595,-3.593
  text ".Designator" at -3.749,-0.25 h0.75
Mechanical 15:
  lines w0.05: -5,-5 -5,5 5,5 5,-5 -5,-5
  lines w0.1: -0.5,0 0.5,0 ; 0,-0.5 0,0.5
3D body "LQFP48-7x7mm.step": height 1.6, standoff 0, extent -4.497,-4.497 4.497,4.497

## MSOP-08 [mm] "TSOP, 8-Leads, Body 2.95x2.95mm, Pitch 0.65mm, IPC Medium Density"
height 1.1
pads (8):
  rect 1.35x0.45 smd: 1(-2.175,0.975) 2(-2.175,0.325) 3(-2.175,-0.325) 4(-2.175,-0.975) 5(2.175,-0.975) 6(2.175,-0.325) 7(2.175,0.325) 8(2.175,0.975)
Top Overlay:
  circle w0.25: c-2.147,1.805 r0.125
  lines w0.2: -1.1,-1.5 -1.1,1.5 1.1,1.5 1.1,-1.5 -1.1,-1.5
Top Assembly:
  circle w0.3: c-1.105,0.996 r0.05
  rectangle: -2.405,0.75 -1.5,1.199
  rectangle: -2.405,0.1 -1.5,0.549
  rectangle: -2.405,-0.55 -1.5,-0.101
  rectangle: -2.405,-1.2 -1.5,-0.751
  region: 2.405,1.2 1.5,1.2 1.5,0.751 2.405,0.751
  region: 2.405,0.55 1.5,0.55 1.5,0.101 2.405,0.101
  region: 2.405,-0.1 1.5,-0.1 1.5,-0.549 2.405,-0.549
  region: 2.405,-0.75 1.5,-0.75 1.5,-1.199 2.405,-1.199
  lines w0.1: -1.5,-1.5 -1.5,1.5 1.5,1.5 1.5,-1.5 -1.5,-1.5
  text ".Designator" at 0.25,-3.749 h0.75
Mechanical 15:
  lines w0.05: -3.075,-1.75 -3.075,1.75 3.075,1.75 3.075,-1.75 -3.075,-1.75
  lines w0.1: -0.5,0 0.5,0 ; 0,-0.5 0,0.5
3D body "TSOP65P480X110-8N.step": height 1.1, standoff 0, extent -2.4,-1.5 2.4,1.5

## MSOP-10 [mm] "TSOP, 8-Leads, Body 2.95x2.95mm, Pitch 0.65mm, IPC Medium Density"
height 1.1
pads (10):
  rect 1x0.3 smd: 1(-2.25,1) 2(-2.25,0.5) 3(-2.25,0) 4(-2.25,-0.5) 5(-2.25,-1) 6(2.25,-1) 7(2.25,-0.5) 8(2.25,0) 9(2.25,0.5) 10(2.25,1)
Top Overlay:
  circle w0.25: c-2.147,1.805 r0.125
  lines w0.2: -1.5,-1.5 1.5,-1.5 1.5,1.5 -1.5,1.5 -1.5,-1.5
Top Assembly:
  circle w0.3: c-1.105,0.996 r0.05
  region: 2.466,-0.85 1.5,-0.85 1.5,-1.15 2.466,-1.15
  region: 2.466,-0.35 1.5,-0.35 1.5,-0.65 2.466,-0.65
  region: 2.466,0.15 1.5,0.15 1.5,-0.15 2.466,-0.15
  region: 2.466,0.65 1.5,0.65 1.5,0.35 2.466,0.35
  region: 2.466,1.15 1.5,1.15 1.5,0.85 2.466,0.85
  rectangle: -2.466,-1.15 -1.5,-0.85
  rectangle: -2.466,-0.65 -1.5,-0.35
  rectangle: -2.466,-0.15 -1.5,0.15
  rectangle: -2.466,0.35 -1.5,0.65
  rectangle: -2.466,0.85 -1.5,1.15
  lines w0.1: -1.5,-1.5 1.5,-1.5 1.5,1.5 -1.5,1.5 -1.5,-1.5
  text ".Designator" at 0.25,-3.749 h0.75
Mechanical 15:
  lines w0.05: -3.075,-1.75 3.075,-1.75 3.075,1.75 -3.075,1.75 -3.075,-1.75
  lines w0.1: -0.5,0 0.5,0 ; 0,-0.5 0,0.5
3D body "MSOP-10.step": height 1, standoff 0, extent -2.464,-1.5 2.464,1.5

## PG-VQFN-8-4 [mm] "SOIC, 8-Leads, Body 4.90x3.90mm, Pitch 1.27mm, IPC Medium Density"
height 1.75
pads (9):
  rect 0.4x0.8 smd: 1(-1.905,-2.85) 2(-0.635,-2.85) 3(0.635,-2.85) 4(1.905,-2.85) 5(1.905,2.85) 6(0.635,2.85) 7(-0.635,2.85) 8(-1.905,2.85)
  rect 4.2x3.4 smd: 9(0,-0.001)
Top Overlay:
  circle w0.25: c-1.905,-2 r0.125
  lines w0.2: -2.45,-3.002 -2.45,3.008 ; -1.5,-3 -1.05,-3 ; -1.49,3 -1.04,3 ; -0.23,-3 0.22,-3 ; -0.22,3 0.23,3 ; 1.04,-3 1.49,-3 ; 1.05,3 1.5,3 ; 2.45,-3.002 2.45,3.008
Top Assembly:
  circle w0.3: c-1.901,-2.509 r0.05
  rectangle: -2.105,2.991 -1.707,3.139
  rectangle: -0.835,2.991 -0.437,3.139
  rectangle: 0.435,2.991 0.833,3.139
  rectangle: 1.705,2.991 2.103,3.139
  region: 2.104,-2.991 1.706,-2.991 1.706,-3.139 2.104,-3.139
  region: 0.834,-2.991 0.436,-2.991 0.436,-3.139 0.834,-3.139
  region: -0.436,-2.991 -0.834,-2.991 -0.834,-3.139 -0.436,-3.139
  region: -1.706,-2.991 -2.104,-2.991 -2.104,-3.139 -1.706,-3.139
  lines w0.1: -2.449,-3.01 -2.449,3.009 2.451,3.009 2.451,-3.01 -2.449,-3.01
  text ".Designator" at -3.749,-0.251 h0.75
Mechanical 15:
  lines w0.05: -2.7,-3.675 -2.7,3.675 2.7,3.675 2.7,-3.675 -2.7,-3.675
  lines w0.1: -0.5,0 0.5,0 ; 0,-0.5 0,0.5
3D body "esim_qfn8-5x6 v0.step": height 0.81, standoff 0, extent -2.5,-3.01 2.5,3.01

## QFN24 [mm]
height 1
pads (49):
  rect 0.6x0.25 smd: 1(-1.9,1.25) 2(-1.9,0.75) 3(-1.9,0.25) 4(-1.9,-0.25) 5(-1.9,-0.75) 6(-1.9,-1.25) 13(1.9,-1.25) 14(1.9,-0.75) 15(1.9,-0.25) 16(1.9,0.25) 17(1.9,0.75) 18(1.9,1.25)
  rect 0.25x0.6 smd: 7(-1.25,-1.9) 8(-0.75,-1.9) 9(-0.25,-1.9) 10(0.25,-1.9) 11(0.75,-1.9) 12(1.25,-1.9) 19(1.25,1.9) 20(0.75,1.9) 21(0.25,1.9) 22(-0.25,1.9) 23(-0.75,1.9) 24(-1.25,1.9)
  rect 2.2x2.2 smd: 25(0,0)
  rect 0.15x0.25 on Mech13: ""(-2.05,-1.25) ""(-2.05,-0.75) ""(-2.05,-0.25) ""(-2.05,0.25) ""(-2.05,0.75) ""(-2.05,1.25) ""(2.05,-1.25) ""(2.05,-0.75) ""(2.05,-0.25) ""(2.05,0.25) ""(2.05,0.75) ""(2.05,1.25)
  rect 0.25x0.15 on Mech13: ""(-1.25,2.05) ""(-1.25,-2.05) ""(-0.75,-2.05) ""(-0.75,2.05) ""(-0.25,2.05) ""(-0.25,-2.05) ""(0.25,2.05) ""(0.25,-2.05) ""(0.75,-2.05) ""(0.75,2.05) ""(1.25,2.05) ""(1.25,-2.05)
Top Overlay:
  lines w0.2: -2,-1.825 -2,-2 -1.825,-2 ; -2,1.825 -2,2 -1.825,2 ; 1.825,-2 2,-2 2,-1.825 ; 1.825,2 2,2 2,1.825
Top Assembly:
  circle w0.3: c-1.63,1.624 r0.05
  lines w0.1: -2,-2 2,-2 2,2 -2,2 -2,-2
  text ".Designator" at -3.749,-0.25 h0.75
Mechanical 15:
  lines w0.05: -2.25,-2.25 2.25,-2.25 2.25,2.25 -2.25,2.25 -2.25,-2.25
  lines w0.1: -0.5,0 0.5,0 ; 0,-0.5 0,0.5
3D body "QFN24.step": height 0.9, standoff 0, extent -2.005,-2.005 2.005,2.005

## QFN64_9x9MC_MCH-M [mil]
pads (65):
  rect 36x10 smd paste+0 mask+0: 1(-175,147.64) 2(-175,127.95) 3(-175,108.27) 4(-175,88.58) 5(-175,68.9) 6(-175,49.21) 7(-175,29.53) 8(-175,9.84) 9(-175,-9.84) 10(-175,-29.53) 11(-175,-49.21) 12(-175,-68.9) 13(-175,-88.58) 14(-175,-108.27) 15(-175,-127.95) 16(-175,-147.64) 33(175,-147.64) 34(175,-127.95) 35(175,-108.27) 36(175,-88.58) 37(175,-68.9) 38(175,-49.21) 39(175,-29.53) 40(175,-9.84) 41(175,9.84) 42(175,29.53) 43(175,49.21) 44(175,68.9) 45(175,88.58) 46(175,108.27) 47(175,127.95) 48(175,147.64)
  rect 10x36 smd paste+0 mask+0: 17(-147.64,-175) 18(-127.95,-175) 19(-108.27,-175) 20(-88.58,-175) 21(-68.9,-175) 22(-49.21,-175) 23(-29.53,-175) 24(-9.84,-175) 25(9.84,-175) 26(29.53,-175) 27(49.21,-175) 28(68.9,-175) 29(88.58,-175) 30(108.27,-175) 31(127.95,-175) 32(147.64,-175) 49(147.64,175) 50(127.95,175) 51(108.27,175) 52(88.58,175) 53(68.9,175) 54(49.21,175) 55(29.53,175) 56(9.84,175) 57(-9.84,175) 58(-29.53,175) 59(-49.21,175) 60(-68.9,175) 61(-88.58,175) 62(-108.27,175) 63(-127.95,175) 64(-147.64,175)
  rect 295x295 smd paste-147 mask+0: 65(0,0)
Top Overlay:
  lines w6: -182,-165.74 -182,-182 -165.74,-182 ; 165.74,-182 182,-182 182,-165.74 ; 165.74,182 182,182 182,165.74
  lines w7.87: -182,165.74 -165.74,182
Top Paste:
  region: 143.56,-92.44 92.44,-92.44 92.44,-143.56 143.56,-143.56
  region: 143.56,-33.44 92.44,-33.44 92.44,-84.56 143.56,-84.56
  region: 143.56,25.56 92.44,25.56 92.44,-25.56 143.56,-25.56
  region: 143.56,84.56 92.44,84.56 92.44,33.44 143.56,33.44
  region: 143.56,143.56 92.44,143.56 92.44,92.44 143.56,92.44
  region: 84.56,-92.44 33.44,-92.44 33.44,-143.56 84.56,-143.56
  region: 84.56,-33.44 33.44,-33.44 33.44,-84.56 84.56,-84.56
  region: 84.56,25.56 33.44,25.56 33.44,-25.56 84.56,-25.56
  region: 84.56,84.56 33.44,84.56 33.44,33.44 84.56,33.44
  region: 84.56,143.56 33.44,143.56 33.44,92.44 84.56,92.44
  region: 25.56,-92.44 -25.56,-92.44 -25.56,-143.56 25.56,-143.56
  region: 25.56,-33.44 -25.56,-33.44 -25.56,-84.56 25.56,-84.56
  region: 25.56,25.56 -25.56,25.56 -25.56,-25.56 25.56,-25.56
  region: 25.56,84.56 -25.56,84.56 -25.56,33.44 25.56,33.44
  region: 25.56,143.56 -25.56,143.56 -25.56,92.44 25.56,92.44
  region: -33.44,-92.44 -84.56,-92.44 -84.56,-143.56 -33.44,-143.56
  region: -33.44,-33.44 -84.56,-33.44 -84.56,-84.56 -33.44,-84.56
  region: -33.44,25.56 -84.56,25.56 -84.56,-25.56 -33.44,-25.56
  region: -33.44,84.56 -84.56,84.56 -84.56,33.44 -33.44,33.44
  region: -33.44,143.56 -84.56,143.56 -84.56,92.44 -33.44,92.44
  region: -92.44,-92.44 -143.56,-92.44 -143.56,-143.56 -92.44,-143.56
  region: -92.44,-33.44 -143.56,-33.44 -143.56,-84.56 -92.44,-84.56
  region: -92.44,25.56 -143.56,25.56 -143.56,-25.56 -92.44,-25.56
  region: -92.44,84.56 -143.56,84.56 -143.56,33.44 -92.44,33.44
  region: -92.44,143.56 -143.56,143.56 -143.56,92.44 -92.44,92.44
Top Assembly:
  drawing of 201 lines, arcs and shapes, not listed
  text ".Designator" at -196.79,-13.12 h39.37
Mechanical 15:
  lines w6: -213,-172.64 -213,172.64 -197,172.64 -197,197 -172.64,197 -172.64,213 172.64,213 172.64,197 197,197 197,172.64 213,172.64 213,-172.64 197,-172.64 197,-197 172.64,-197 172.64,-213 -172.64,-213 -172.64,-197 -197,-197 -197,-172.64 -213,-172.64
3D body "QFN64_9x9MC_MCH.step": height 39.09, standoff 0, extent -177.01,-177.01 177.01,177.01

## QFN65P500X500X80-21N [mm]
height 0.8
pads (21):
  rect 0.84x0.32 smd: 1(-2.435,1.3) 2(-2.435,0.65) 3(-2.435,0) 4(-2.435,-0.65) 5(-2.435,-1.3) 11(2.435,-1.3) 12(2.435,-0.65) 13(2.435,0) 14(2.435,0.65) 15(2.435,1.3)
  rect 0.32x0.84 smd: 6(-1.3,-2.435) 7(-0.65,-2.435) 8(0,-2.435) 9(0.65,-2.435) 10(1.3,-2.435) 16(1.3,2.435) 17(0.65,2.435) 18(0,2.435) 19(-0.65,2.435) 20(-1.3,2.435)
  rect 3.25x3.25 smd paste-0.595: 21(0,0)
Top Overlay:
  circle w0.2: c-3.46,1.3 r0.1
  lines w0.127: -2.5,-1.78 -2.5,-2.5 -1.78,-2.5 ; -2.5,1.78 -2.5,2.5 -1.78,2.5 ; 1.78,-2.5 2.5,-2.5 2.5,-1.78 ; 1.78,2.5 2.5,2.5 2.5,1.78
Top Assembly:
  circle w0.2: c-1.585,1.625 r0.1
  region: -1.459,2.643 -1.459,2.514 -1.14,2.514 -1.14,2.643
  region: -0.809,2.643 -0.809,2.514 -0.49,2.514 -0.49,2.643
  region: -0.159,2.643 -0.159,2.514 0.16,2.514 0.16,2.643
  region: 0.491,2.643 0.491,2.514 0.81,2.514 0.81,2.643
  region: 1.141,2.643 1.141,2.514 1.46,2.514 1.46,2.643
  region: 2.643,1.459 2.514,1.459 2.514,1.14 2.643,1.14
  region: 2.643,0.809 2.514,0.809 2.514,0.49 2.643,0.49
  region: 2.643,0.159 2.514,0.159 2.514,-0.16 2.643,-0.16
  region: 2.643,-0.491 2.514,-0.491 2.514,-0.81 2.643,-0.81
  region: 2.643,-1.141 2.514,-1.141 2.514,-1.46 2.643,-1.46
  region: 1.459,-2.643 1.459,-2.514 1.14,-2.514 1.14,-2.643
  region: 0.809,-2.643 0.809,-2.514 0.49,-2.514 0.49,-2.643
  region: 0.159,-2.643 0.159,-2.514 -0.16,-2.514 -0.16,-2.643
  region: -0.491,-2.643 -0.491,-2.514 -0.81,-2.514 -0.81,-2.643
  region: -1.141,-2.643 -1.141,-2.514 -1.46,-2.514 -1.46,-2.643
  rectangle: -2.643,-1.459 -2.514,-1.14
  rectangle: -2.643,-0.809 -2.514,-0.49
  rectangle: -2.643,-0.159 -2.514,0.16
  rectangle: -2.643,0.491 -2.514,0.81
  rectangle: -2.643,1.141 -2.514,1.46
  lines w0.127: -2.5,-2.5 2.5,-2.5 2.5,2.5 -2.5,2.5 -2.5,-2.5
  text ".Designator" at -3.749,-0.25 h0.75
Mechanical 15:
  lines w0.05: -3.105,-3.105 -3.105,3.105 3.105,3.105 3.105,-3.105 -3.105,-3.105
3D body "step_temp.STEP": height 0.8, standoff 0, extent -2.5,-2.5 2.5,2.5

## SC-88A [mm] "SC-88A"
height 0.6
pads (5):
  rect 0.5x0.4 smd: 1(-0.95,0.65) 2(-0.95,0) 3(-0.95,-0.65) 4(0.95,-0.65) 5(0.95,0.65)
Top Overlay:
  lines w0.2: -0.65,-1.086 0.6,-1.086 ; -0.65,1.079 0.6,1.079
Top Assembly:
  circle w0.3: c-0.292,0.511 r0.05
  rectangle: -1.05,-0.775 -0.6,-0.525
  rectangle: -1.05,-0.125 -0.6,0.125
  rectangle: -1.05,0.525 -0.6,0.775
  region: 1.05,0.775 0.6,0.775 0.6,0.525 1.05,0.525
  region: 1.05,-0.525 0.6,-0.525 0.6,-0.775 1.05,-0.775
  lines w0.1: -0.6,-1.086 0.6,-1.086 0.6,1.079 -0.6,1.079 -0.6,-1.086
  text ".Designator" at 0.333,-1.999 h0.4
Mechanical 15:
  lines w0.05: -1.2,-0.95 -1.2,0.95 1.2,0.95 1.2,-0.95 -1.2,-0.95
  lines w0.1: -0.5,0 0.5,0 ; 0,-0.5 0,0.5
3D body "SC-88A.step": height 1.01, standoff 0, extent -1.05,-1 1.05,1

## SO08 [mm]
pads (8):
  rect 1.25x0.53 smd: 1(-2.65,1.905) 2(-2.65,0.635) 3(-2.65,-0.635) 4(-2.65,-1.905) 5(2.65,-1.905) 6(2.65,-0.635) 7(2.65,0.635) 8(2.65,1.905)
Top Overlay:
  circle w0.3: c-1.202,1.892 r0.05
  lines w0.2: -1.75,-2.575 1.75,-2.575 1.75,2.54 0.318,2.54 cw(c0,2.54) -0.318,2.54 -1.75,2.54 -1.75,-2.575
Top Assembly:
  circle w0.3: c-1.202,1.892 r0.05
  rectangle: -2.889,0.418 -1.75,0.824
  rectangle: -2.889,1.688 -1.75,2.094
  rectangle: -2.889,-0.852 -1.75,-0.446
  rectangle: -2.889,-2.122 -1.75,-1.716
  region: 2.889,-1.688 1.75,-1.688 1.75,-2.094 2.889,-2.094
  region: 2.889,-0.418 1.75,-0.418 1.75,-0.824 2.889,-0.824
  region: 2.889,0.852 1.75,0.852 1.75,0.446 2.889,0.446
  region: 2.889,2.122 1.75,2.122 1.75,1.716 2.889,1.716
  lines w0.2: -1.75,-2.575 1.75,-2.575 1.75,2.54 0.318,2.54 cw(c0,2.54) -0.318,2.54 -1.75,2.54 -1.75,-2.575
  text ".Designator" at 0.178,-2.563 h0.5
3D body "SO8.step": height 1.46, standoff 0.01, extent -2.889,-2.452 2.889,2.45

## SO08 - EP1 [mm]
pads (9):
  rect 1.5x0.8 smd: 1(-2.7,1.905) 2(-2.7,0.635) 3(-2.7,-0.635) 4(-2.7,-1.905) 5(2.7,-1.905) 6(2.7,-0.635) 7(2.7,0.635) 8(2.7,1.905)
  rect 2.5x3.7 smd: 9(0,0)
Top Overlay:
  circle w0.3: c-4.339,1.883 r0.05
  lines w0.2: -1.75,-2.575 1.75,-2.575 ; -1.75,2.54 -0.318,2.54 ccw(c0,2.54) 0.318,2.54 1.75,2.54
Top Assembly:
  circle w0.3: c-1.202,1.892 r0.05
  rectangle: -2.889,1.671 -1.75,2.094
  region: 2.889,0.869 1.75,0.869 1.75,0.446 2.889,0.446
  region: 2.889,-0.401 1.75,-0.401 1.75,-0.824 2.889,-0.824
  region: 2.889,-1.671 1.75,-1.671 1.75,-2.094 2.889,-2.094
  rectangle: -2.889,-2.139 -1.75,-1.716
  rectangle: -2.889,-0.869 -1.75,-0.446
  rectangle: -2.889,0.401 -1.75,0.824
  region: 2.889,2.139 1.75,2.139 1.75,1.716 2.889,1.716
  lines w0.2: -1.75,-2.575 1.75,-2.575 1.75,2.54 0.318,2.54 cw(c0,2.54) -0.318,2.54 -1.75,2.54 -1.75,-2.575
  text ".Designator" at 0.178,-2.563 h0.5
3D body "SO8.step": height 1.46, standoff 0.01, extent -2.891,-2.464 2.888,2.439

## SOIC127P600X175-8N [mm] "SOIC, 8-Leads, Body 4.90x3.90mm, Pitch 1.27mm, IPC Medium Density"
height 1.75
pads (16):
  rect 1.5x0.6 smd: 1(-2.7,1.905) 2(-2.7,0.635) 3(-2.7,-0.635) 4(-2.7,-1.905) 5(2.7,-1.905) 6(2.7,-0.635) 7(2.7,0.635) 8(2.7,1.905)
  rect 1.5x0.6 on Mech13: ""(-2.7,-1.905) ""(-2.7,-0.635) ""(-2.7,0.635) ""(-2.7,1.905) ""(2.7,-1.905) ""(2.7,-0.635) ""(2.7,0.635) ""(2.7,1.905)
Top Overlay:
  circle w0.25: c-2.7,2.755 r0.125
  lines w0.2: -1.55,-2.45 -1.55,2.45 1.55,2.45 1.55,-2.45 -1.55,-2.45
Top Assembly:
  circle w0.3: c-1.525,1.925 r0.05
  lines w0.1: -1.947,-2.451 1.953,-2.451 1.953,2.449 -1.947,2.449 -1.947,-2.451
  text ".Designator" at 0.25,-3.749 h0.75
Mechanical 15:
  lines w0.05: -3.675,-2.7 -3.675,2.7 3.675,2.7 3.675,-2.7 -3.675,-2.7
  lines w0.1: -0.5,0 0.5,0 ; 0,-0.5 0,0.5
3D body "SOIC127P600X175-8N.step": height 1.75, standoff 0, extent -3,-2.45 3,2.45

## SOIC 14 [mm] "SOIC, 14-Leads, Body 9.90x3.90mm, Pitch 1.27mm, IPC Medium Density"
height 1.75
pads (14):
  rect 1.5x0.6 smd: 1(-2.7,3.81) 2(-2.7,2.54) 3(-2.7,1.27) 4(-2.7,0) 5(-2.7,-1.27) 6(-2.7,-2.54) 7(-2.7,-3.81) 8(2.7,-3.81) 9(2.7,-2.54) 10(2.7,-1.27) 11(2.7,0) 12(2.7,1.27) 13(2.7,2.54) 14(2.7,3.81)
Top Overlay:
  circle w0.25: c-2.7,4.7 r0.125
  lines w0.2: -1.6,-4.445 1.6,-4.445 1.6,4.445 -1.6,4.445 -1.6,-4.445
Top Assembly:
  circle w0.3: c-1.27,3.81 r0.05
  rectangle: 2.023,3.51 3.018,4.11
  rectangle: 2.023,2.24 3.018,2.84
  rectangle: 2.023,0.97 3.018,1.57
  rectangle: 2.023,-0.3 3.018,0.3
  rectangle: 2.023,-1.57 3.018,-0.97
  rectangle: 2.023,-2.84 3.018,-2.24
  rectangle: 2.023,-4.11 3.018,-3.51
  region: -2.023,-3.51 -3.018,-3.51 -3.018,-4.11 -2.023,-4.11
  region: -2.023,-2.24 -3.018,-2.24 -3.018,-2.84 -2.023,-2.84
  region: -2.023,-0.97 -3.018,-0.97 -3.018,-1.57 -2.023,-1.57
  region: -2.023,0.3 -3.018,0.3 -3.018,-0.3 -2.023,-0.3
  region: -2.023,1.57 -3.018,1.57 -3.018,0.97 -2.023,0.97
  region: -2.023,2.84 -3.018,2.84 -3.018,2.24 -2.023,2.24
  region: -2.023,4.11 -3.018,4.11 -3.018,3.51 -2.023,3.51
  lines w0.1: -2,-4.445 2,-4.445 2,4.445 -2,4.445 -2,-4.445
  text ".Designator" at 0.178,-2.563 h0.5
Mechanical 15:
  lines w0.05: -3.725,-4.7 3.725,-4.7 3.725,4.7 -3.725,4.7 -3.725,-4.7
  lines w0.1: -0.5,0 0.5,0 ; 0,-0.5 0,0.5
3D body "User Library-SOT108-2.STEP": height 1.6, standoff 0, extent -3.059,-4.301 3.189,4.301